# Altium footprint library Footprint.PcbLib: 411 footprints (part 19 of 26)
Each footprint in its own frame and in the unit in brackets; x right, y up, seen from the top. Pads: shape width x height; smd on the part's side, far side on the other; paste and mask are expansions set on the pad; w line width, h text height; cw(c..) or ccw(c..) is an arc to the next point about the centre after c.
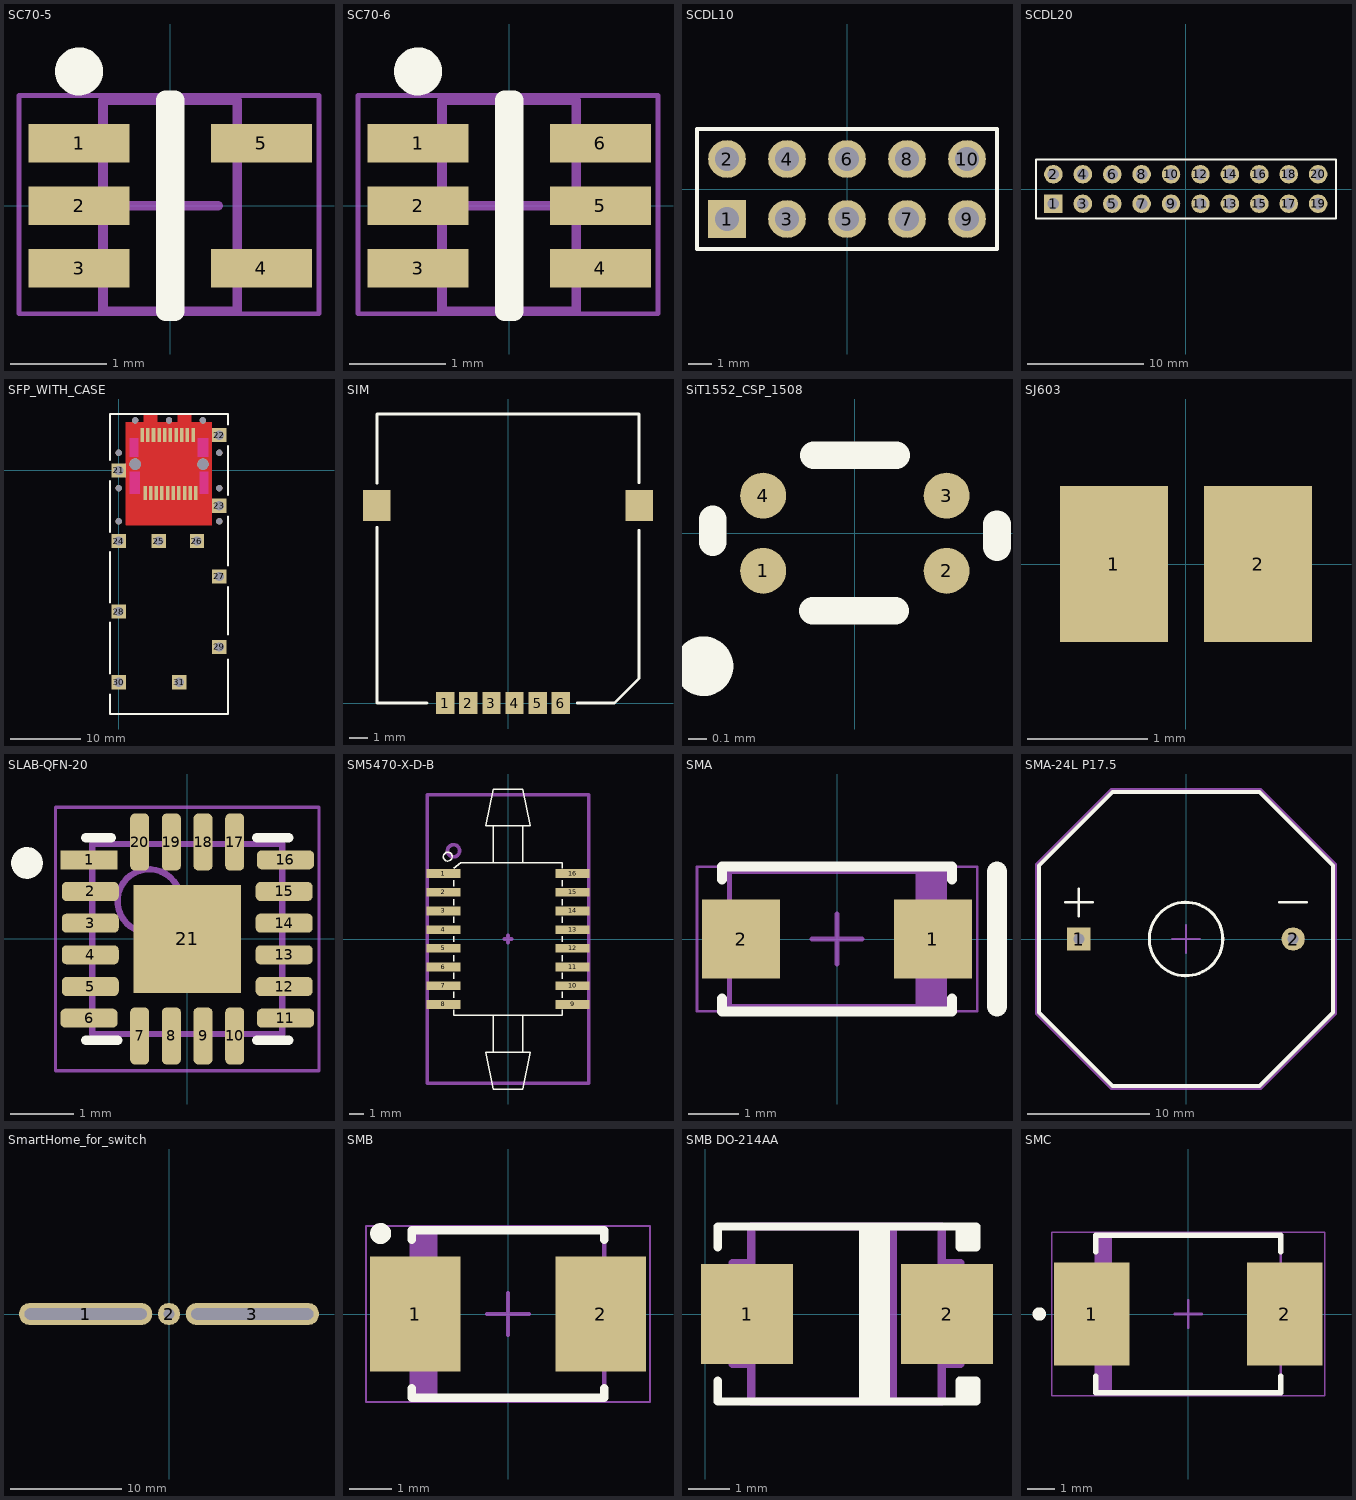
[diagram p18: the footprints below, top view; thin cyan lines are the x and y axes]

## SC70-5 [mm] "SOT363, 6-Leads, Body 2x1.3mm, Pitch 0.65mm, Lead Span 2.1mm, IPC Low Density"
height 1.1
pads (5):
  rect 1.05x0.4 smd: 1(-0.95,0.65) 2(-0.95,0) 3(-0.95,-0.65) 4(0.95,-0.65) 5(0.95,0.65)
Top Overlay:
  circle w0.25: c-0.95,1.4 r0.125
  lines w0.2: -0.05,-1.1 -0.05,1.1 0.05,1.1 0.05,-1.1 -0.05,-1.1
Mechanical 13:
  lines w0.1: -0.7,-1.1 0.7,-1.1 0.7,1.1 -0.7,1.1 -0.7,-1.1
Mechanical 15:
  lines w0.05: -1.575,-1.125 1.55,-1.125 1.55,1.15 -1.575,1.15 -1.575,-1.125
  lines w0.1: -0.5,0 0.5,0 ; 0,-0.5 0,0.5
3D body "User Library-SC70-5-1.step": height 0.95, standoff 0, extent -1.05,-1 1.05,1

## SC70-6 [mm] "SOT363, 6-Leads, Body 2x1.3mm, Pitch 0.65mm, Lead Span 2.1mm, IPC Low Density"
height 1.1
pads (6):
  rect 1.05x0.4 smd: 1(-0.95,0.65) 2(-0.95,0) 3(-0.95,-0.65) 4(0.95,-0.65) 5(0.95,0) 6(0.95,0.65)
Top Overlay:
  circle w0.25: c-0.95,1.4 r0.125
  lines w0.2: -0.05,-1.1 0.05,-1.1 0.05,1.1 -0.05,1.1 -0.05,-1.1
Mechanical 13:
  lines w0.1: -0.7,-1.1 -0.7,1.1 0.7,1.1 0.7,-1.1 -0.7,-1.1
Mechanical 15:
  lines w0.05: -1.575,-1.125 -1.575,1.15 1.55,1.15 1.55,-1.125 -1.575,-1.125
  lines w0.1: -0.5,0 0.5,0 ; 0,-0.5 0,0.5
3D body: height 1.1, standoff 0, extent -0.7,-1.1 0.7,1.1

## SCDL10 [mm]
pads (10):
  rect 1.6x1.6 hole 1: 1(-5.08,-1.27)
  round 1.6 hole 1: 2(-5.08,1.27) 3(-2.54,-1.27) 4(-2.54,1.27) 5(0,-1.27) 6(0,1.27) 7(2.54,-1.27) 8(2.54,1.27) 9(5.08,-1.27) 10(5.08,1.27)
Top Overlay:
  lines w0.15: -6.35,-2.54 6.35,-2.54 6.35,2.54 -6.35,2.54 -6.35,-2.54
3D body "User Library-ds1002-01-1_2v13_asm.STEP": height 4.2, standoff -3.2, extent -6.35,-2.54 -3.81,2.54
3D body "User Library-ds1002-01-1_2v13_asm.STEP": height 4.2, standoff -3.2, extent -3.81,-2.54 -1.27,2.54
3D body "User Library-ds1002-01-1_2v13_asm.STEP": height 4.2, standoff -3.2, extent -1.27,-2.54 1.27,2.54
3D body "User Library-ds1002-01-1_2v13_asm.STEP": height 4.2, standoff -3.2, extent 1.27,-2.54 3.81,2.54
3D body "User Library-ds1002-01-1_2v13_asm.STEP": height 4.2, standoff -3.2, extent 3.81,-2.54 6.35,2.54

## SCDL20 [mm]
pads (20):
  rect 1.6x1.6 hole 1: 1(-11.43,-1.27)
  round 1.6 hole 1: 2(-11.43,1.27) 3(-8.89,-1.27) 4(-8.89,1.27) 5(-6.35,-1.27) 6(-6.35,1.27) 7(-3.81,-1.27) 8(-3.81,1.27) 9(-1.27,-1.27) 10(-1.27,1.27) 11(1.27,-1.27) 12(1.27,1.27) 13(3.81,-1.27) 14(3.81,1.27) 15(6.35,-1.27) 16(6.35,1.27) 17(8.89,-1.27) 18(8.89,1.27) 19(11.43,-1.27) 20(11.43,1.27)
Top Overlay:
  lines w0.15: -12.93,-2.54 -12.93,2.54 12.97,2.54 12.97,-2.54 -12.93,-2.54
3D body "User Library-ds1002-01-1_2v13_asm.STEP": height 4.2, standoff -3.2, extent 10.16,-2.54 12.7,2.54
3D body "User Library-ds1002-01-1_2v13_asm.STEP": height 4.2, standoff -3.2, extent 7.62,-2.54 10.16,2.54
3D body "User Library-ds1002-01-1_2v13_asm.STEP": height 4.2, standoff -3.2, extent 5.08,-2.54 7.62,2.54
3D body "User Library-ds1002-01-1_2v13_asm.STEP": height 4.2, standoff -3.2, extent 2.54,-2.54 5.08,2.54
3D body "User Library-ds1002-01-1_2v13_asm.STEP": height 4.2, standoff -3.2, extent 0,-2.54 2.54,2.54
3D body "User Library-ds1002-01-1_2v13_asm.STEP": height 4.2, standoff -3.2, extent -2.54,-2.54 0,2.54
3D body "User Library-ds1002-01-1_2v13_asm.STEP": height 4.2, standoff -3.2, extent -5.08,-2.54 -2.54,2.54
3D body "User Library-ds1002-01-1_2v13_asm.STEP": height 4.2, standoff -3.2, extent -7.62,-2.54 -5.08,2.54
3D body "User Library-ds1002-01-1_2v13_asm.STEP": height 4.2, standoff -3.2, extent -10.16,-2.54 -7.62,2.54
3D body "User Library-ds1002-01-1_2v13_asm.STEP": height 4.2, standoff -3.2, extent -12.7,-2.54 -10.16,2.54

## SFP_WITH_CASE [mm]
height 3.43
pads (42):
  rect 0.5x2 smd: 1(3.73,-3.2) 2(4.53,-3.2) 3(5.33,-3.2) 4(6.13,-3.2) 5(6.93,-3.2) 6(7.73,-3.2) 7(8.53,-3.2) 8(9.33,-3.2) 9(10.13,-3.2) 10(10.93,-3.2) 11(10.53,5) 12(9.73,5) 13(8.93,5) 14(8.13,5) 15(7.33,5) 16(6.53,5) 17(5.73,5) 18(4.93,5) 19(4.13,5) 20(3.33,5)
  rect 2x2 hole 1.3: 21(0,0) 22(14.25,5) 23(14.25,-5) 24(0,-10) 25(5.68,-10) 26(11.08,-10) 27(14.25,-15) 28(0,-20) 29(14.25,-25) 30(0,-30) 31(8.58,-30)
  round 0.9 hole 0.9 unplated: ""(0,-7.2) ""(0,-2.5) ""(0,2.5) ""(2.33,7.1) ""(7.13,7.1) ""(11.93,7.1) ""(14.25,-7.2) ""(14.25,-2.5) ""(14.25,2.5)
  round 1.6 hole 1.6 unplated: ""(2.33,0.9) ""(11.93,0.9)
Top Layer:
  pour cut-out: 1.016,6.858 3.556,6.858 3.556,7.874 5.461,7.874 5.461,6.858 8.382,6.858 8.382,7.874 10.287,7.874 10.287,6.858 13.208,6.858 13.208,-7.747 1.016,-7.747
Top Layer keep-out:
  rectangle: 11.176,1.905 12.7,4.572
  rectangle: 11.43,-3.302 12.7,-0.127
  rectangle: 1.524,-3.302 3.048,-0.127
  rectangle: 1.524,1.905 2.794,4.572
Top Overlay:
  lines w0.254: -1.25,-31.75 -1.25,-34.5 15.5,-34.5 15.5,-26.75 ; -1.25,-28.75 -1.25,-21.5 ; -1.25,-18.75 -1.25,-11.5 ; -1.25,-8.75 -1.25,-1.5 ; -1.25,1.5 -1.25,8 15.5,8 15.5,6.5 ; 15.5,-23.25 15.5,-16.5 ; 15.5,-13.5 15.5,-6.5 ; 15.5,-3.5 15.5,3.5
3D body "User Library-U77A1118X00X.step": height 10.34, standoff -2.23, extent -0.724,-41.5 15.124,7.475
3D body "User Library-M-UE75-A20-X000T-REVG4.step": height 5.25, standoff -1.08, extent 1.62,-3.587 12.62,5.353

## SIM [mm]
pads (8):
  rect 1x1.2 smd: 1(-3.45,0) 2(-2.18,0) 3(-0.91,0) 4(0.36,0) 5(1.63,0) 6(2.9,0)
  rect 1.5x1.7 smd: ""(-7.2,10.85) ""(7.2,10.85)
Top Overlay:
  lines w0.15: -7.2,9.652 -7.2,0 -4.445,0 ; -7.2,12.065 -7.2,15.875 7.2,15.875 7.2,12.104 ; 3.81,0 5.842,0 7.2,1.358 7.2,9.486
3D body: height 2, standoff 0, extent -7.239,0 7.493,16.129

## SiT1552_CSP_1508 [mm]
pads (4):
  round 0.25 smd mask+0.05: 1(-0.5,-0.205) 2(0.5,-0.205) 3(0.5,0.205) 4(-0.5,0.205)
Top Overlay:
  circle w0.254: c-0.825,-0.725 r0.035
  lines w0.15: -0.775,-0.05 -0.775,0.075 ; -0.23,-0.422 0.22,-0.422 ; -0.225,0.425 0.225,0.425 ; 0.775,-0.075 0.775,0.05
3D body "CSP_1508_4pins.stp": height 0.5, standoff -0.07, extent -0.77,-0.42 0.77,0.42

## SJ603 [mm]
pads (2):
  rect 0.9x1.3 smd: 1(-0.6,0) 2(0.6,0)

## SLAB-QFN-20 [mm] "QFN, 20-Leads, Body 3x3mm, Pitch 0.5mm, Thermal Pad 1.7x1.7mm"
height 0.9
pads (21):
  rect 0.9x0.3 smd: 1(-1.55,1.25)
  rrect50% 0.9x0.3 smd: 2(-1.53,0.75) 3(-1.53,0.25) 4(-1.53,-0.25) 5(-1.53,-0.75) 6(-1.55,-1.25) 11(1.55,-1.25) 12(1.53,-0.75) 13(1.53,-0.25) 14(1.53,0.25) 15(1.53,0.75) 16(1.55,1.25)
  rrect50% 0.3x0.9 smd: 7(-0.75,-1.53) 8(-0.25,-1.53) 9(0.25,-1.53) 10(0.75,-1.53) 17(0.75,1.53) 18(0.25,1.53) 19(-0.25,1.53) 20(-0.75,1.53)
  rect 1.7x1.7 smd: 21(0,0)
Top Overlay:
  circle w0.25: c-2.53,1.2 r0.125
  lines w0.15: -1.6,-1.6 -1.1,-1.6 ; -1.6,1.6 -1.2,1.6 ; 1.1,-1.6 1.6,-1.6 ; 1.1,1.6 1.6,1.6
Mechanical 13:
  circle w0.1: c-0.6,0.6 r0.5
  lines w0.1: -1.5,-1.5 -1.5,1.5 1.5,1.5 1.5,-1.5 -1.5,-1.5
Mechanical 15:
  lines w0.05: -2.08,-2.08 -2.08,2.08 2.08,2.08 2.08,-2.08 -2.08,-2.08
  lines w0.1: -0.5,0 0.5,0 ; 0,-0.5 0,0.5
3D body: height 0.9, standoff 0, extent -1.5,-1.5 1.5,1.5

## SM5470-X-D-B [mm]
pads (16):
  rect 2.3x0.6 smd: 1(-4.388,4.445) 2(-4.388,3.175) 3(-4.388,1.905) 4(-4.388,0.635) 5(-4.388,-0.635) 6(-4.388,-1.905) 7(-4.388,-3.175) 8(-4.388,-4.445) 9(4.388,-4.445) 10(4.388,-3.175) 11(4.388,-1.905) 12(4.388,-0.635) 13(4.388,0.635) 14(4.388,1.905) 15(4.388,3.175) 16(4.388,4.445)
Top Overlay:
  circle w0.1: c-4.1,5.6 r0.3
  lines w0.1: -3.7,-4.8 -3.7,-5.2 3.7,-5.2 3.7,-4.8 ; -3.7,-4 -3.7,-3.6 ; -3.7,-2.7 -3.7,-2.3 ; -3.7,-1.5 -3.7,-1.1 ; -3.7,-0.2 -3.7,0.2 ; -3.7,1.1 -3.7,1.5 ; -3.7,2.3 -3.7,2.7 ; -3.7,3.6 -3.7,4 ; -3.7,4.8 -3.2,5.2 3.7,5.2 3.7,4.8 ; -1,-7.7 -1,-5.2 ; -1,5.2 -1,7.7 ; 1,-7.7 1,-5.2 ; 1,5.2 1,7.7 ; 3.7,-4 3.7,-3.6 ; 3.7,-2.7 3.7,-2.3 ; 3.7,-1.5 3.7,-1.1 ; 3.7,-0.2 3.7,0.2 ; 3.7,1.1 3.7,1.5 ; 3.7,2.3 3.7,2.7 ; 3.7,3.6 3.7,4 ; -1.5,-7.7 1.5,-7.7 1,-10.2 -1,-10.2 -1.5,-7.7 ; -1.5,7.7 -1,10.2 1,10.2 1.5,7.7 -1.5,7.7
Mechanical 15:
  circle w0.254: c-3.7,6 r0.412
  lines w0.254: -0.254,0 0.254,0 ; 0,-0.254 0,0.254 ; -5.5,-9.8 5.5,-9.8 5.5,9.8 -5.5,9.8 -5.5,-9.8
  text "0,0" at 0.254,0 h1.52
  text ".Designator" at -2.9,10.7 h1.52
3D body "SM5470-001-D-B.STEP": height 5.54, standoff -0.13, extent -5.138,-9.805 5.162,9.795

## SMA [mm] "Molded Diode, 2-Leads, Body 4.292x2.693mm"
height 2.44
pads (2):
  rect 1.555x1.57 smd: 1(1.915,0) 2(-1.915,0)
Top Overlay:
  lines w0.2: -2.298,-1.185 -2.298,-1.448 2.298,-1.448 2.298,-1.185 ; -2.298,1.185 -2.298,1.448 2.298,1.448 2.298,1.185
  lines w0.4: 3.193,-1.346 3.193,1.346
Mechanical 13:
  region: 2.146,1.346 1.569,1.346 1.569,-1.346 2.146,-1.346
  lines w0.1: -2.146,-1.346 2.146,-1.346 2.146,1.346 -2.146,1.346 -2.146,-1.346
Mechanical 15:
  lines w0.05: -2.795,-1.446 2.795,-1.446 2.795,1.446 -2.795,1.446 -2.795,-1.446
  lines w0.1: -0.5,0 0.5,0 ; 0,-0.5 0,0.5
3D body: height 2.44, standoff 0, extent -2.146,-1.346 2.146,1.346

## SMA-24L P17.5 [mm]
pads (2):
  rect 1.9x1.9 hole 0.9: 1(-8.75,0)
  round 1.9 hole 0.9: 2(8.75,0)
Top Overlay:
  circle w0.254: c0,0 r3
  lines w0.2: -9.875,3 -7.625,3 ; -8.75,1.875 -8.75,4.125 ; 7.625,3 9.875,3
  lines w0.3: -12,-6 -6,-12 6,-12 12,-6 12,6 6,12 -6,12 -12,6 -12,-6
Courtyard Top:
  lines w0.2: -12.25,-6.1 -12.25,6.1 -6.1,12.25 6.1,12.25 12.25,6.1 12.25,-6.1 6.1,-12.25 -6.1,-12.25 -12.25,-6.1
Top Component Center:
  lines w0.2: -1.125,0 1.125,0 ; 0,-1.125 0,1.125
3D body "Sonitron-SMA(T)-24 P17_5.STEP": height 15.51, standoff -5.5, extent -12,-12 12,12

## SmartHome_for_switch [mm]
pads (3):
  oval 12x2 hole 1 slot 11 at 0 deg: 1(-7.5,0) 3(7.5,0)
  round 2 hole 1: 2(0,0)

## SMB [mm] "Molded Diode, 2-Leads, Body 4.292x2.693mm"
height 2.44
pads (2):
  rect 2.159x2.743 smd: 1(-2.21,0) 2(2.21,0)
Top Overlay:
  circle w0.25: c-3.04,1.921 r0.125
  lines w0.2: -2.3,-1.772 -2.3,-2 2.3,-2 2.3,-1.772 ; -2.3,1.772 -2.3,2 2.3,2 2.3,1.772
Mechanical 13:
  rectangle: -2.3,-1.975 -1.681,1.975
  lines w0.1: -2.3,-1.975 2.3,-1.975 2.3,1.975 -2.3,1.975 -2.3,-1.975
Mechanical 15:
  lines w0.05: -3.39,-2.1 3.39,-2.1 3.39,2.1 -3.39,2.1 -3.39,-2.1
  lines w0.1: -0.5,0 0.5,0 ; 0,-0.5 0,0.5
3D body: height 2.42, standoff 0, extent -2.3,-1.975 2.3,1.975

## SMB DO-214AA [mm] "DO-214AA(SMB)"
height 2.5
pads (2):
  rect 2.2x2.4 smd: 1(1,0) 2(5.8,0)
Top Overlay:
  region: 4.428,2.1 3.692,2.1 3.692,-2.1 4.428,-2.1
  lines w0.2: 0.3,-1.6 0.3,-2.1 6.5,-2.1 ; 0.3,1.6 0.3,2.1 6.5,2.1 6.5,1.6 6.1,1.6 6.1,2 ; 6.1,-2 6.1,-1.6 6.5,-1.6 ; 6.2,-2 6.2,-1.6 ; 6.2,1.6 6.2,2 ; 6.3,-2 6.3,-1.6 ; 6.3,1.6 6.3,2 ; 6.4,-2.1 6.4,-1.7 ; 6.4,1.7 6.4,2.1 ; 6.5,-2.1 6.5,-1.6 ; 6.5,-2.1 6.5,-1.6
Mechanical 1:
  lines w0.2: 1.1,-1.2 0.65,-1.2 0.65,1.225 1.1,1.225 ; 4.325,-2.1 4.325,2.1 ; 4.5,-2.1 4.5,2.1 ; 5.675,-1.2 6.125,-1.2 6.125,1.225 5.675,1.225 ; 1.1,-2.1 1.1,2.1 5.675,2.1 5.675,-2.1 1.1,-2.1
3D body "SMB.STEP": height 2.4, standoff 0, extent 0.6,-1.9 6.2,1.9

## SMC [mil] "Molded, 2-Leads, Body 6.86x5.84mm"
height 99.02
pads (2):
  rect 110x150 smd: 1(-140.49,0) 2(140.49,0)
Top Overlay:
  circle w9.84: c-217.15,0 r4.92
  lines w7.87: -135.04,-90.75 -135.04,-114.96 135.04,-114.96 135.04,-90.75 ; -135.04,90.75 -135.04,114.96 135.04,114.96 135.04,90.75
Mechanical 13:
  rectangle: -135.45,-114.96 -111.25,114.96
  lines w3.94: -135.04,-114.96 -135.04,114.96 135.04,114.96 135.04,-114.96 -135.04,-114.96
Mechanical 15:
  lines w1.97: -199.43,-118.9 -199.43,118.9 199.43,118.9 199.43,-118.9 -199.43,-118.9
  lines w3.94: -19.68,0 19.69,0 ; 0,-19.68 0,19.68
3D body: height 99.02, standoff 1.97, extent -135.04,-114.96 135.04,114.96